# Altium schematic symbol library BC9VPC.SchLib: 1 symbol
Pins are listed as number, name and electrical type; pins without a type are passive.

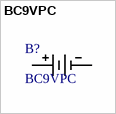
[diagram p0: symbol BC9VPC]

## BC9VPC
designator B?
Description; Manufacturer_Name: Memory Protection Devices; Copyright: Copyright (C) 2026 Ultra Librarian. All rights reserved.; Manufacturer_Part_Number: BC9VPC
footprint BC9VPC_MPD
pins: 1, 2